# Altium footprint library RBM_ALTIUM_PCB_LIBRARY.PcbLib: 107 footprints (part 4 of 7)
Each footprint in its own frame and in the unit in brackets; x right, y up, seen from the top. Pads: shape width x height; smd on the part's side, far side on the other; paste and mask are expansions set on the pad; w line width, h text height; cw(c..) or ccw(c..) is an arc to the next point about the centre after c.
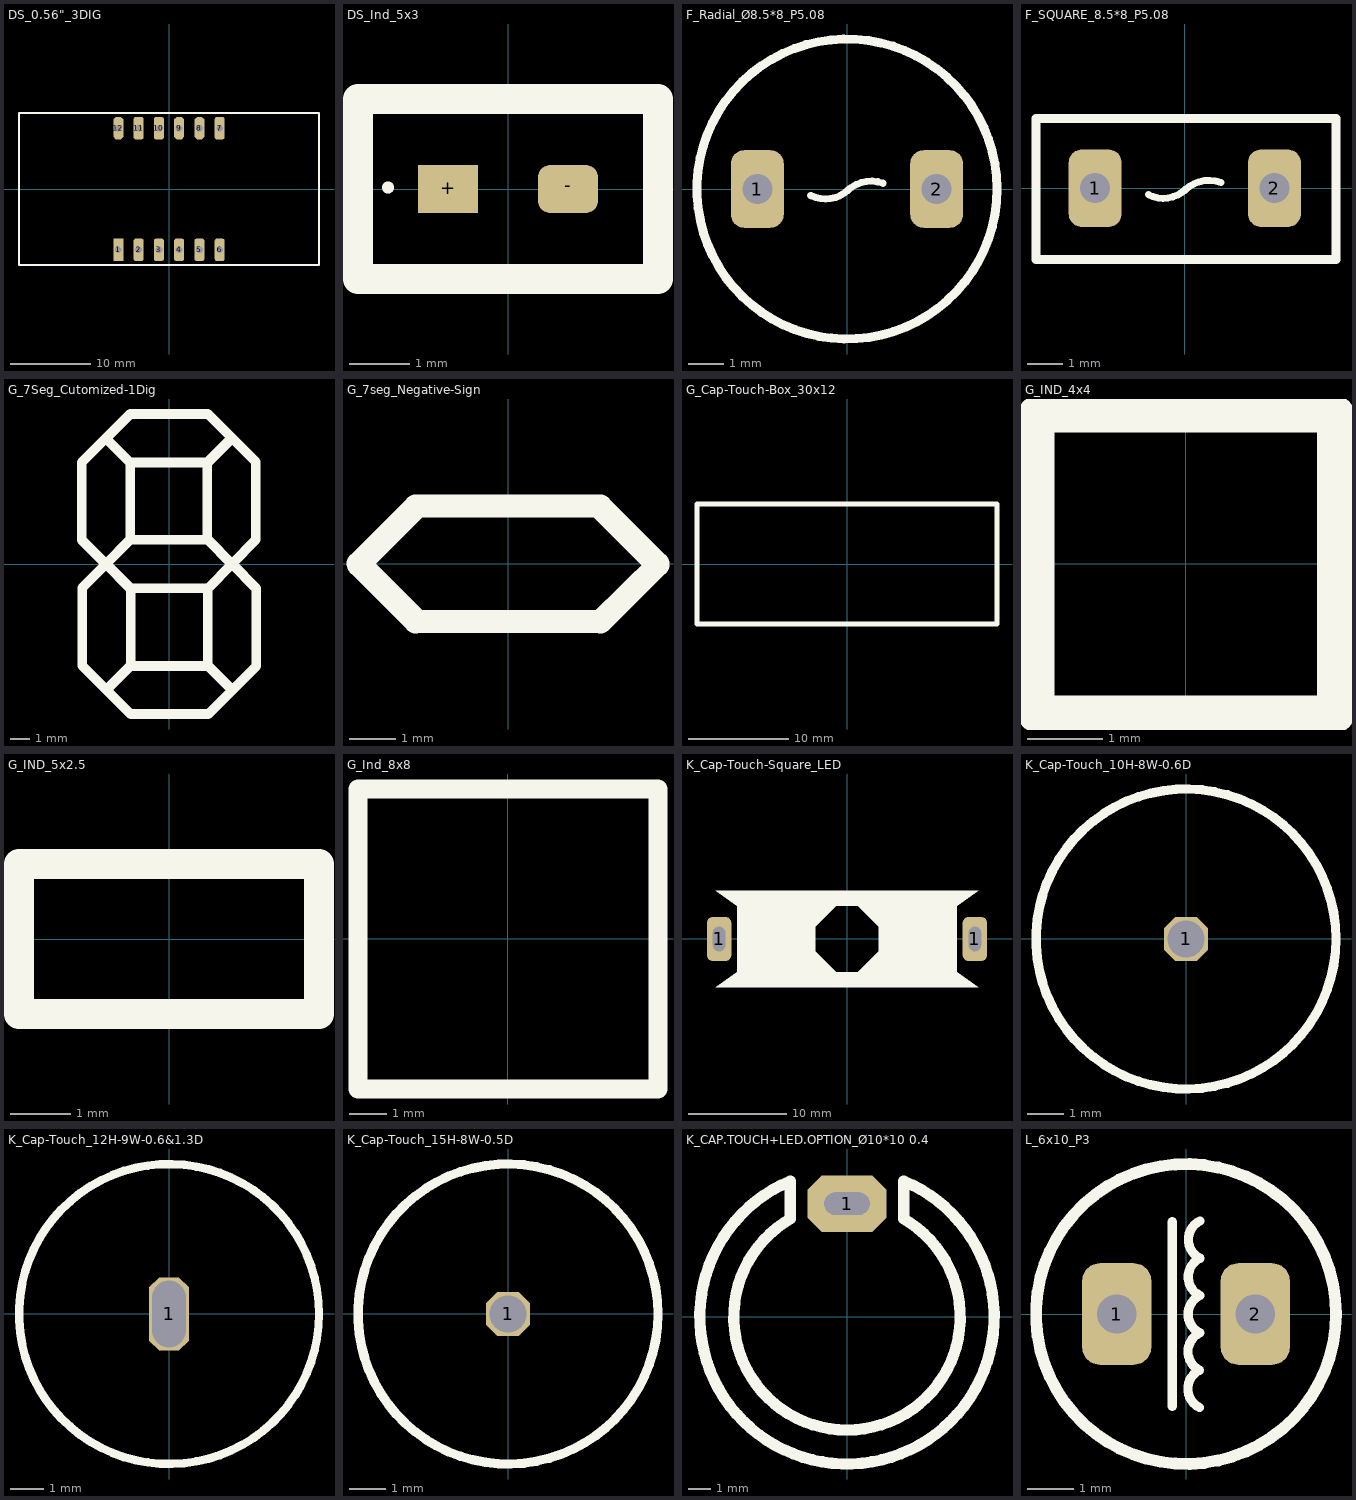
[diagram p3: the footprints below, top view; thin cyan lines are the x and y axes]

## DS_0.56"_3DIG [mm]
pads (12):
  rect 1.25x2.85 hole 0.85: 1(-6.35,-7.62)
  rrect50% 1.25x2.85 hole 0.85: 2(-3.81,-7.62) 3(-1.27,-7.62) 4(1.27,-7.62) 5(3.81,-7.62) 6(6.35,-7.62) 7(6.35,7.62) 10(-1.27,7.62) 11(-3.81,7.62)
  oct 1.25x2.85 hole 0.85: 8(3.81,7.62) 9(1.27,7.62) 12(-6.35,7.62)
Top Overlay:
  lines w0.2: -18.796,-9.525 -18.796,9.525 18.796,9.525 18.796,-9.525 -18.796,-9.525
Bottom Overlay:
  text "D1" at -5.67,4.2 h1
  text "D2" at 2.13,4.2 h1
  text "D3" at 4.64,4.2 h1
  text "d" at -3.5,-4.8 h1
  text "dp" at -0.5,-4.7 h1
  text "e" at -6.1,-4.767 h1
  text "c" at 1.6,-4.7 h1
  text "g" at 4.1,-4.567 h1
  text "f" at -1.07,4.3 h1
  text "b" at 6.73,4.2 h1
  text "a" at -3.37,4.3 h1
3D body "User Library-5631_w_o_color_jam.step": height 8.1, standoff -5.5, extent -18.796,-9.525 18.804,9.475

## DS_Ind_5x3 [mm]
pads (2):
  rect 1x0.8 smd: +(-1,0)
  rrect50% 1x0.8 smd: -(1,0)
Top Overlay:
  circle w0.1: c-2,0.025 r0.05
  lines w0.5: -2.5,-1.5 -2.5,1.5 2.5,1.5 2.5,-1.5 -2.5,-1.5
3D body "ALSRobot-LED0603(R).step": height 0.6, standoff 0, extent -0.81,-0.4 0.81,0.4

## F_Radial_Ø8.5*8_P5.08 [mm] "37011000000; Through Hole,P=5.08mm Fuses with Leads (Through Hole) RoHS"
pads (2):
  rrect50% 1.5x2.2 hole 0.85: 1(-2.54,0) 2(2.54,0)
Top Overlay:
  lines w0.2: -1.028,-0.184 ccw(c-0.609,0.633) 0.034,-0.022 ; 0.001,-0.057 cw(c0.685,-0.753) 1.023,0.162
  lines w0.254: 4.25,0 cw(c0,0) 4.25,0.019
3D body "User Library-Fuísivel 37200500411.step": height 8, standoff -4.3, extent -4.25,-4.25 4.25,4.25

## F_SQUARE_8.5*8_P5.08 [mm] "Littelfuse 39211000440; TE5 Time-Lag Fuse"
pads (2):
  rrect50% 1.5x2.2 hole 0.85: 1(-2.54,0) 2(2.54,0)
Top Overlay:
  lines w0.2: -1.028,-0.184 ccw(c-0.609,0.633) 0.034,-0.022 ; 0.001,-0.057 cw(c0.685,-0.753) 1.023,0.162
  lines w0.254: -4.216,-2.022 4.284,-2.022 4.284,1.978 -4.216,1.978 -4.216,-2.022
3D body "User Library-A3D-008-00001.step": height 8, standoff -3, extent -4.216,-2.022 4.284,1.978

## G_7Seg_Cutomized-1Dig [mm]
Top Overlay:
  lines w0.5: -4.475,1.237 -3.237,0 ; -3.263,0 -4.5,1.237 -4.5,5.237 -3.263,6.475 ; -3.237,6.5 -2,7.737 2,7.737 3.237,6.5 4.475,5.263 4.475,1.263 3.237,0.025 ; -3.212,-6.475 -1.975,-5.237 2.025,-5.237 3.263,-6.475 ; -3.212,-6.45 -1.975,-5.212 -1.975,-1.212 -3.212,0.025 ; -2,-7.687 -3.237,-6.45 -4.475,-5.212 -4.475,-1.212 -3.237,0.025 ; -2,-1.212 -3.237,0.025 ; -2,7.712 -3.237,6.475 ; -1.975,-7.712 2.025,-7.712 3.263,-6.475 ; 3.212,0.025 1.975,1.263 1.975,5.263 3.212,6.5 ; 3.237,-6.475 2,-5.237 2,-1.237 ; 3.237,6.475 2,5.237 -2,5.237 ; 3.263,0 4.5,-1.237 4.5,-5.237 3.263,-6.475 ; 4.475,-1.237 3.237,0 ; -3.237,0 -2,-1.237 2,-1.237 ; -3.237,0 -2,1.237 ; -3.237,0 -2,1.237 ; -3.237,0.025 -2,1.263 2,1.263 ; -3.237,6.475 -2,5.237 ; -3.237,6.475 -2,5.237 ; -2,1.237 -2,5.237 ; 2,-1.237 3.237,0 ; 2,-1.237 3.237,0 ; 2,1.263 3.237,0.025 ; 2,1.263 3.237,0.025
3D body: height 8, standoff 0, extent -3.511,-0.238 -1.767,1.506
3D body: height 8, standoff 0, extent -3.515,-1.478 -1.772,0.265
3D body: height 8, standoff 0, extent 1.748,-1.487 3.492,0.257
3D body: height 8, standoff 0, extent -2.25,1 2.238,1.5
3D body: height 8, standoff 0, extent 1.753,-0.247 3.497,1.497
3D body: height 8, standoff 0, extent -2.25,-1.5 2.238,-1
3D body: height 8, standoff 0, extent 1.759,-0.305 3.503,1.439
3D body: height 8, standoff 0, extent 3,-0.309 4.743,1.435
3D body: height 8, standoff 0, extent 3.008,4.954 4.752,6.698
3D body: height 8, standoff 0, extent 1.765,0.956 2.265,5.444
3D body: height 8, standoff 0, extent 1.768,4.959 3.511,6.703
3D body: height 8, standoff 0, extent 4.265,0.956 4.765,5.444
3D body: height 8, standoff 0, extent 1.757,-6.711 3.501,-4.967
3D body: height 8, standoff 0, extent 2.997,-6.715 4.741,-4.972
3D body: height 8, standoff 0, extent 3.006,-1.452 4.749,0.292
3D body: height 8, standoff 0, extent 1.763,-5.45 2.263,-0.962
3D body: height 8, standoff 0, extent 1.765,-1.447 3.509,0.297
3D body: height 8, standoff 0, extent 4.263,-5.45 4.763,-0.962
3D body: height 8, standoff 0, extent 1.773,-7.956 3.517,-6.212
3D body: height 8, standoff 0, extent 1.778,-6.715 3.522,-4.971
3D body: height 8, standoff 0, extent -3.486,-6.707 -1.742,-4.963
3D body: height 8, standoff 0, extent -2.232,-7.95 2.256,-7.45
3D body: height 8, standoff 0, extent -3.49,-7.947 -1.747,-6.203
3D body: height 8, standoff 0, extent -2.232,-5.45 2.256,-4.95
3D body: height 8, standoff 0, extent -3.466,-1.433 -1.722,0.311
3D body: height 8, standoff 0, extent -4.706,-1.428 -2.963,0.315
3D body: height 8, standoff 0, extent -4.715,-6.692 -2.971,-4.948
3D body: height 8, standoff 0, extent -2.228,-5.438 -1.728,-0.95
3D body: height 8, standoff 0, extent -3.475,-6.697 -1.731,-4.953
3D body: height 8, standoff 0, extent -4.728,-5.438 -4.228,-0.95
3D body: height 8, standoff 0, extent -3.494,4.967 -1.75,6.711
3D body: height 8, standoff 0, extent -4.735,4.972 -2.991,6.715
3D body: height 8, standoff 0, extent -4.743,-0.292 -2.999,1.452
3D body: height 8, standoff 0, extent -2.256,0.962 -1.756,5.45
3D body: height 8, standoff 0, extent -3.503,-0.297 -1.759,1.447
3D body: height 8, standoff 0, extent -4.756,0.962 -4.256,5.45
3D body: height 8, standoff 0, extent 1.767,4.994 3.511,6.738
3D body: height 8, standoff 0, extent 1.772,6.235 3.515,7.978
3D body: height 8, standoff 0, extent -3.492,6.243 -1.748,7.987
3D body: height 8, standoff 0, extent -2.238,5 2.25,5.5
3D body: height 8, standoff 0, extent -3.497,5.003 -1.753,6.747
3D body: height 8, standoff 0, extent -2.238,7.5 2.25,8

## G_7seg_Negative-Sign [mm]
Top Overlay:
  lines w0.5: -3.237,0 -2,1.237 ; -3.212,0 -1.975,-1.237 ; -2,-1.263 -3.237,-0.025 -2,1.212 ; 1.975,1.237 3.212,0 ; 2,-1.263 3.25,-0.025 ; 2,-1.25 -2,-1.25 -3.25,0 -2,1.25 2,1.25 3.25,0 ; 2,1.237 3.237,0
3D body: height 8, standoff 0, extent 1.767,-1.506 3.511,0.238
3D body: height 8, standoff 0, extent 1.772,-0.265 3.515,1.478
3D body: height 8, standoff 0, extent -3.492,-0.257 -1.748,1.487
3D body: height 8, standoff 0, extent -2.238,-1.5 2.25,-1
3D body: height 8, standoff 0, extent -3.497,-1.497 -1.753,0.247
3D body: height 8, standoff 0, extent -2.244,1 2.244,1.5

## G_Cap-Touch-Box_30x12 [mm]
Top Overlay:
  lines w0.5: -15,-6 15,-6 15,6 -15,6 -15,-6
3D body: height 8, standoff 0, extent -15.25,-6.206 -14.75,6.207
3D body: height 8, standoff 0, extent -15.206,-6.25 15.207,-5.75
3D body: height 8, standoff 0, extent 14.75,-6.206 15.25,6.207
3D body: height 8, standoff 0, extent -15.206,5.75 15.207,6.25

## G_IND_4x4 [mm]
Top Overlay:
  lines w0.5: -2,-2 -2,2 2,2 2,-2 -2,-2
3D body: height 8, standoff 0, extent -2.256,1.75 2.257,2.25
3D body: height 8, standoff 0, extent -2.25,-2.257 -1.75,2.256
3D body: height 8, standoff 0, extent -2.263,-2.25 2.25,-1.75
3D body: height 8, standoff 0, extent 1.75,-2.256 2.25,2.257

## G_IND_5x2.5 [mm]
Top Overlay:
  lines w0.5: -2.506,-1.244 -2.506,1.256 2.494,1.256 2.494,-1.244 -2.506,-1.244
3D body: height 8, standoff 0, extent 2.244,-1.48 2.744,1.492
3D body: height 8, standoff 0, extent -2.74,-1.494 2.727,-0.994
3D body: height 8, standoff 0, extent -2.756,-1.48 -2.256,1.492
3D body: height 8, standoff 0, extent -2.739,1.006 2.728,1.506

## G_Ind_8x8 [mm]
Top Overlay:
  lines w0.5: -3.994,-4.006 4.006,-4.006 4.006,3.994 -3.994,3.994 -3.994,-4.006
3D body: height 8, standoff 0, extent 3.756,-4.241 4.256,4.229
3D body: height 8, standoff 0, extent -4.229,-4.256 4.241,-3.756
3D body: height 8, standoff 0, extent -4.244,-4.241 -3.744,4.228
3D body: height 8, standoff 0, extent -4.228,3.744 4.241,4.244

## K_Cap-Touch-Square_LED [mm]
pads (2):
  rrect50% 2.5x4.5 hole 2.5 slot 1.25 at 0 deg: 1(-13,0) 1(13,0)
Top Overlay:
  rectangle: -11.2,-3.5 -3.2,3.5
  region: 11.2,3.5 3.2,3.5 3.2,-3.5 11.2,-3.5
  region: 13.35,4.9 11.2,3.4 -11.2,3.4 -13.35,4.9
  region: -3.5,1 -1,3.5 -3.5,3.5
  region: -1,-3.5 -3.5,-1 -3.5,-3.5
  region: 1,3.5 3.5,1 3.5,3.5
  region: 3.5,-1 1,-3.5 3.5,-3.5
  region: -13.35,-4.9 -11.2,-3.4 11.2,-3.4 13.35,-4.9
3D body "spring rectangle.STEP": height 11.61, standoff -1.03, extent -13.35,-4.85 13.35,4.858

## K_Cap-Touch_10H-8W-0.6D [mm]
pads (1):
  oct 1.2x1.2 / inner oct 1x1 / far side oct 2.5x2.5 hole 1: 1(0,0)
Top Overlay:
  circle w0.254: c0,0 r4.09
3D body: height 10, standoff 0, extent -4,-3.997 4,3.997
3D body: height 3, standoff -3, extent -0.258,-0.259 0.26,0.26

## K_Cap-Touch_12H-9W-0.6&1.3D [mm]
pads (1):
  oct 1.2x2.2 / inner oct 1x1 / far side oct 3x3 hole 2 slot 1 at 0 deg: 1(0,0)
Top Overlay:
  circle w0.254: c0,0 r4.5
3D body: height 5, standoff -3, extent -0.3,-0.7 0.3,0.7
3D body: height 12, standoff 0, extent -4.5,-4.5 4.5,4.5

## K_Cap-Touch_15H-8W-0.5D [mm]
pads (1):
  oct 1.2x1.2 / inner oct 1x1 / far side oct 2.5x2.5 hole 1: 1(0,0)
Top Overlay:
  circle w0.254: c0,0 r4.09
3D body: height 3, standoff -3, extent -0.258,-0.259 0.26,0.26
3D body: height 15, standoff 0, extent -4,-3.997 4,3.997

## K_CAP.TOUCH+LED.OPTION_Ø10*10 0.4 [mm]
pads (1):
  oct 3.5x2.5 hole 2 slot 1 at 90 deg: 1(0,5)
Top Overlay:
  lines w0.5: -2.5,6 -2.5,4.33 ccw(c0,0) 2.5,4.33 2.5,6 cw(c0,0) -2.5,6
3D body "Touch_Spring.STEP": height 11.25, standoff -2.76, extent -5.25,-5.25 5.25,5.25

## L_6x10_P3 [mm]
pads (2):
  rrect50% 1.5x2.2 hole 0.85: 1(-1.5,0) 2(1.5,0)
Top Overlay:
  circle w0.254: c0,0 r3.25
  lines w0.2: -0.3,-2 -0.3,2 ; 0.293,-2.025 cw(c0.489,-1.622) 0.295,-1.217 cw(c0.492,-0.813) 0.298,-0.408 cw(c0.494,-0.005) 0.3,0.4 cw(c0.497,0.804) 0.302,1.208 cw(c0.499,1.612) 0.305,2.017
3D body: height 2, standoff -1, extent 1.202,-0.299 1.8,0.3
3D body: height 2, standoff -1, extent -1.799,-0.299 -1.201,0.299
3D body: height 13, standoff 10, extent -3.242,-3.316 3.258,3.177
3D body: height 3.25, standoff 0.25, extent -3.242,-3.316 3.258,3.177
3D body: height 11.5, standoff 0.5, extent -2.993,-3.07 3.006,2.93